# Altium footprint library footprints.PcbLib: 65 footprints (part 1 of 5)
Each footprint in its own frame and in the unit in brackets; x right, y up, seen from the top. Pads: shape width x height; smd on the part's side, far side on the other; paste and mask are expansions set on the pad; w line width, h text height; cw(c..) or ccw(c..) is an arc to the next point about the centre after c.
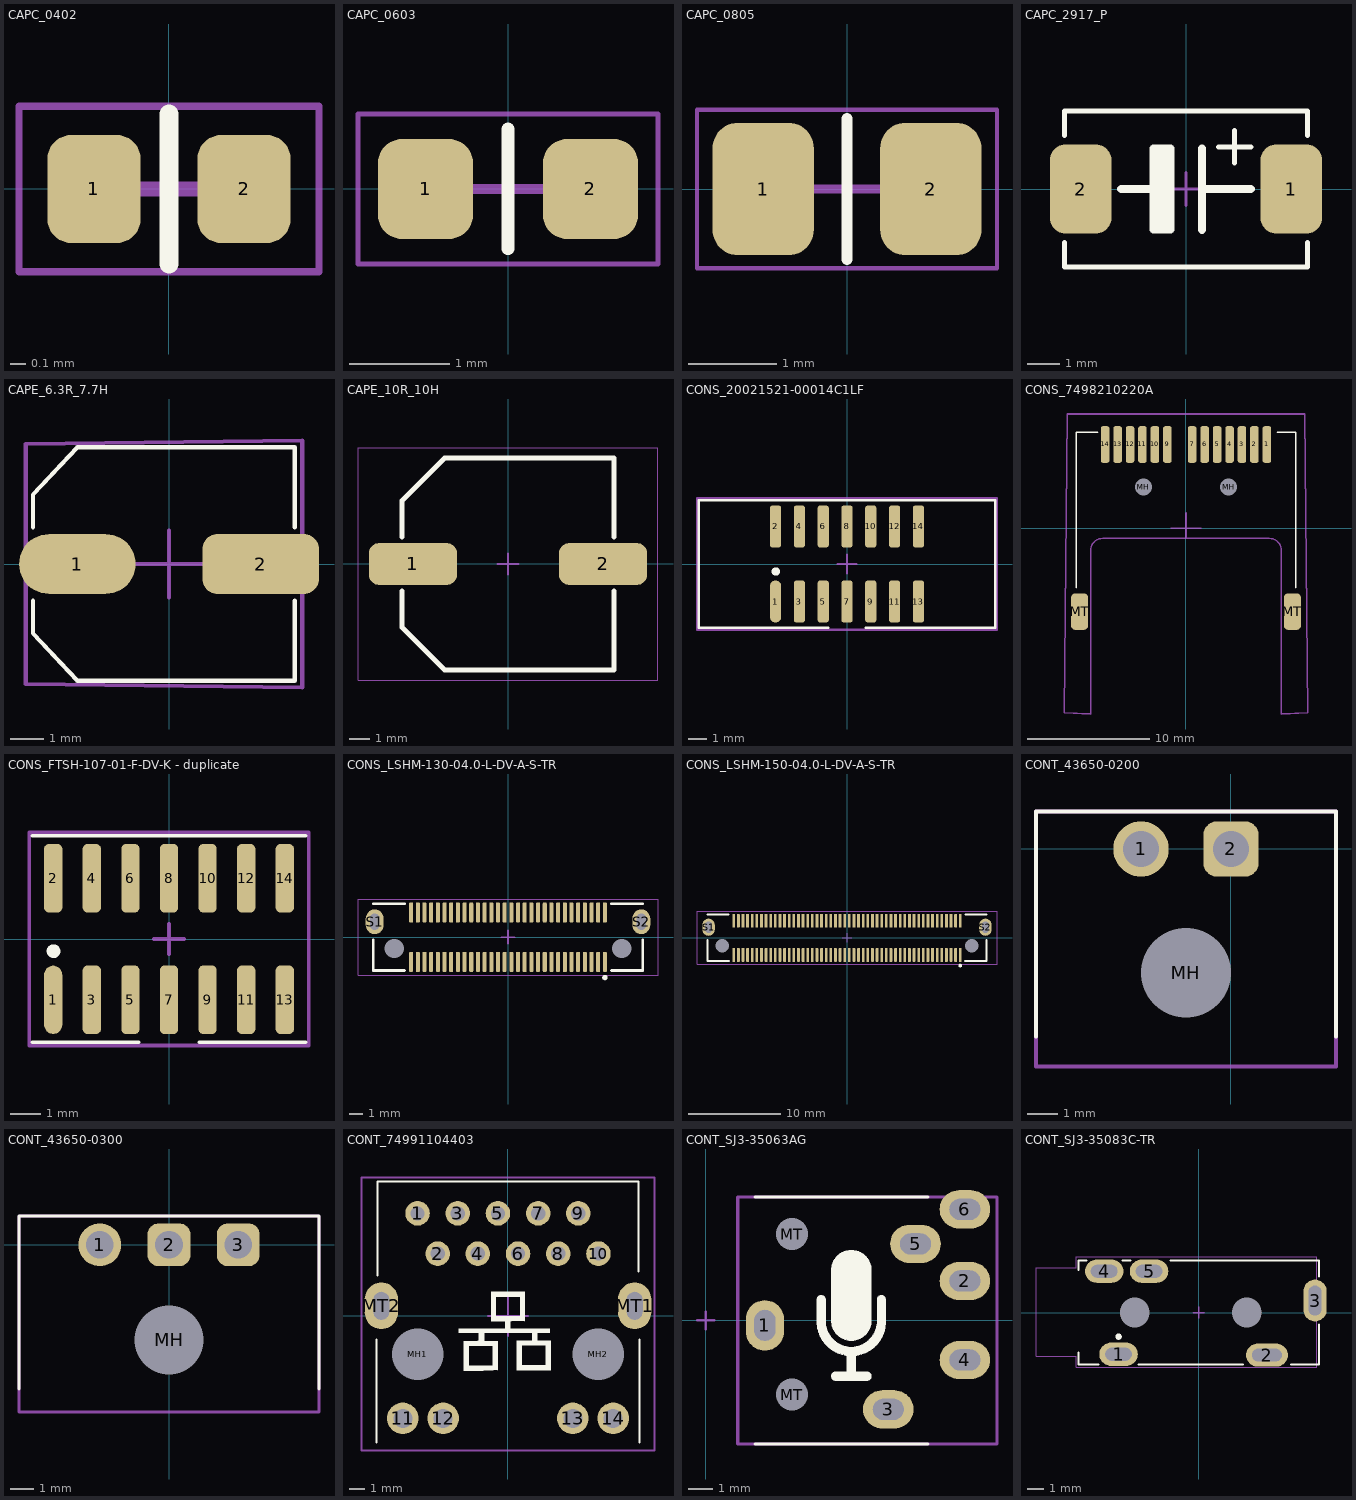
[diagram p0: the footprints below, top view; thin cyan lines are the x and y axes]

## CAPC_0402 [mm] "Chip Capacitor, 2-Leads, Body 1,00x0,50mm, IPC Medium Density"
height 0.7
pads (2):
  rrect50% 0.62x0.72 smd: 1(-0.5,0) 2(0.5,0)
Top Overlay:
  lines w0.125: 0,-0.5 0,0 0,0.5
Mechanical 15:
  lines w0.05: -1,-0.55 -1,0.55 1,0.55 1,-0.55 -1,-0.55
  lines w0.1: -0.35,0 0.35,0 ; 0,-0.35 0,0.35
3D body "CAPC1005X07N.step": height 0.7, standoff 0, extent -0.6,-0.35 0.6,0.35

## CAPC_0603 [mm] "Chip Capacitor, 2-Leads, Body 1,60x0,80mm, IPC Medium Density"
height 1
pads (2):
  rrect50% 0.95x1 smd: 1(-0.825,0) 2(0.825,0)
Top Overlay:
  lines w0.125: 0,-0.6 0,0 0,0.6
Mechanical 15:
  lines w0.05: -1.5,-0.75 -1.5,0.75 1.5,0.75 1.5,-0.75 -1.5,-0.75
  lines w0.1: -0.5,0 0.5,0 ; 0,-0.5 0,0.5
3D body "CAPC1608X10N.step": height 1, standoff 0, extent -0.95,-0.5 0.95,0.5

## CAPC_0805 [mm] "Chip Capacitor, 2-Leads, Body 2,00x1,25mm, IPC Medium Density"
height 1.5
pads (2):
  rrect50% 1.15x1.5 smd: 1(-0.95,0) 2(0.95,0)
Top Overlay:
  lines w0.125: 0,-0.8 0,0 0,0.8
Mechanical 15:
  lines w0.05: -1.7,-0.9 -1.7,0.9 1.7,0.9 1.7,-0.9 -1.7,-0.9
  lines w0.1: -0.5,0 0.5,0 ; 0,-0.5 0,0.5
3D body "CAPC2012X15N.step": height 1.5, standoff 0, extent -1.175,-0.75 1.175,0.75

## CAPC_2917_P [mm]
pads (2):
  rrect50% 1.9x2.75 smd: 1(3.25,0) 2(-3.25,0)
Top Overlay:
  region: -1,1.25 -0.5,1.25 -0.5,-1.25 -1,-1.25
  lines w0.15: -3.75,-1.65 -3.75,-2.4 3.75,-2.4 3.75,-1.65 ; -3.75,1.65 -3.75,2.4 3.75,2.4 3.75,1.65 ; 1,1.3 1.5,1.3 ; 1.5,0.8 1.5,1.3 ; 1.5,1.8 1.5,1.3 ; 2,1.3 1.5,1.3
  lines w0.25: -1.995,0.005 -0.495,0.005 ; -0.5,0 -0.5,1.25 ; 0.495,1.245 0.495,-1.255 0.495,-0.005 1.995,-0.005 ; -1,-1.25 -0.477,-1.25 -0.477,1.25 -1,1.25 -1,-1.25
Mechanical 15:
  lines w0.1: -0.5,0 0.5,0 ; 0,-0.5 0,0.5
3D body "293D226X9035D2TE3.stp": height 2.88, standoff -0.04, extent -3.594,-2.219 3.594,2.197

## CAPE_6.3R_7.7H [mm]
pads (2):
  oval 3.5x1.8 smd: 1(-2.75,0)
  rrect50% 3.5x1.8 smd: 2(2.75,0)
Top Overlay:
  lines w0.125: -4.078,-1.1 -4.078,-2.078 -2.75,-3.5 3.773,-3.5 3.773,-1.1 ; -4.078,1.1 -4.078,2.078 -2.75,3.5 3.773,3.5 3.773,1.1
Mechanical 15:
  lines w0.125: -1,0 0,0 ; 0,-1 0,0 ; 0,1 0,0 ; 1,0 0,0 ; -4.3,-3.6 4,-3.7 4,0 4,3.7 -4.3,3.6 -4.3,0 -4.3,-3.6
3D body "EDK107M035S9HAA.stp": height 8.01, standoff 0, extent -3.95,-3.4 3.65,3.4

## CAPE_10R_10H [mm] "Aluminum Electrolytic Capacitor, Body 10,30x10,30x10,50mm, IPC Medium Density"
height 10.5
pads (2):
  rrect50% 4.3x2.05 smd: 1(-4.625,0) 2(4.625,0)
Top Overlay:
  lines w0.25: -5.15,-1.325 -5.15,-3.087 -3.087,-5.15 5.15,-5.15 5.15,-1.325 ; -5.15,1.325 -5.15,3.087 -3.087,5.15 5.15,5.15 5.15,1.325
Mechanical 15:
  lines w0.05: -7.3,-5.65 7.3,-5.65 7.3,5.65 -7.3,5.65 -7.3,-5.65
  lines w0.1: -0.5,0 0.5,0 ; 0,-0.5 0,0.5
3D body "CAPAE120103X105N.step": height 10.5, standoff 0, extent -6,-5.15 6,5.15

## CONS_20021521-00014C1LF [mm]
pads (14):
  oval 0.6x2.25 smd: 1(-3.81,-2)
  rrect50% 0.6x2.25 smd: 2(-3.81,2) 3(-2.54,-2) 4(-2.54,2) 5(-1.27,-2) 6(-1.27,2) 7(0,-2) 8(0,2) 9(1.27,-2) 10(1.27,2) 11(2.54,-2) 12(2.54,2) 13(3.81,-2) 14(3.81,2)
Top Overlay:
  circle w0.25: c-3.8,-0.4 r0.1
  lines w0.125: -1,-3.4 -4.5,-3.4 -7.9,-3.4 -7.9,3.4 -4.5,3.4 1,3.4 4.5,3.4 7.9,3.4 7.9,-3.4 4.5,-3.4 1,-3.4
Mechanical 15:
  lines w0.125: -0.5,0 0,0 ; 0,-0.5 0,0 ; 0,0.5 0,0 ; 0.5,0 0,0 ; -8,-3.5 8,-3.5 8,3.5 -8,3.5 -8,-3.5
3D body "20021521-00014C1LF--3DModel-STEP-554624.STEP": height 5.6, standoff 0, extent -7.595,-2.75 7.595,2.75

## CONS_7498210220A [mm]
pads (17):
  rrect50% 0.7x3 smd: 1(6.63,6.85) 2(5.61,6.85) 3(4.59,6.85) 4(3.57,6.85) 5(2.55,6.85) 6(1.53,6.85) 7(0.51,6.85) 9(-1.53,6.85) 10(-2.55,6.85) 11(-3.57,6.85) 12(-4.59,6.85) 13(-5.61,6.85) 14(-6.63,6.85)
  round 1 hole 1.4 unplated: MH(-3.5,3.35) MH(3.5,3.35)
  rrect50% 1.4x3 smd: MT(-8.725,-6.85) MT(8.725,-6.85)
Top Overlay:
  lines w0.125: -9,-4.9 -9,7.85 -7.25,7.85 ; 7.5,7.85 9,7.85 9,-4.9
Mechanical 15:
  lines w0.125: -1.25,0 0,0 ; -7.825,-8.55 -7.825,-15.25 -10,-15.15 -9.75,9.35 0,9.35 9.75,9.35 10,-15.15 7.825,-15.25 7.825,-8.55 ; -7.825,-8.55 -7.825,-3.55 ; -7.825,-8.55 -7.825,-3.55 ; -7.825,-3.55 -7.825,-1.85 cw(c-6.825,-1.85) -6.825,-0.85 -5,-0.85 ; -5,-0.85 0,-0.85 ; -5,-0.85 0,-0.85 ; 0,-0.85 0,0 ; 0,-0.85 0,0 ; 0,-0.85 5,-0.85 ; 0,-0.85 5,-0.85 ; 0,0 1.25,0 0,0 ; 0,0 0,1.25 0,0 ; 5,-0.85 6.825,-0.85 cw(c6.825,-1.85) 7.825,-1.85 7.825,-3.55 ; 7.825,-8.55 7.825,-3.55 ; 7.825,-8.55 7.825,-3.55
3D body "7498210220A.stp": height 8.9, standoff -2.4, extent -8.775,-14.82 8.775,7.655

## CONS_FTSH-107-01-F-DV-K - duplicate [mm]
pads (14):
  oval 0.6x2.25 smd: 1(-3.81,-2)
  rrect50% 0.6x2.25 smd: 2(-3.81,2) 3(-2.54,-2) 4(-2.54,2) 5(-1.27,-2) 6(-1.27,2) 7(0,-2) 8(0,2) 9(1.27,-2) 10(1.27,2) 11(2.54,-2) 12(2.54,2) 13(3.81,-2) 14(3.81,2)
Top Overlay:
  circle w0.25: c-3.8,-0.4 r0.1
  lines w0.125: -4.5,-3.4 -1,-3.4 ; -4.5,3.4 1,3.4 4.5,3.4 ; 1,-3.4 4.5,-3.4
Mechanical 15:
  lines w0.125: -0.5,0 0,0 ; 0,-0.5 0,0 ; 0,0.5 0,0 ; 0.5,0 0,0 ; -4.6,-3.5 4.6,-3.5 4.6,3.5 -4.6,3.5 -4.6,-3.5
3D body "FTSH-107-01-F-DV-K.stp": height 6.11, standoff -0.01, extent -4.445,-2.921 4.445,2.921

## CONS_LSHM-130-04.0-L-DV-A-S-TR [mm]
pads (64):
  rrect50% 0.3x1.5 smd: 1(7.25,-1.85) 2(7.25,1.85) 3(6.75,-1.85) 4(6.75,1.85) 5(6.25,-1.85) 6(6.25,1.85) 7(5.75,-1.85) 8(5.75,1.85) 9(5.25,-1.85) 10(5.25,1.85) 11(4.75,-1.85) 12(4.75,1.85) 13(4.25,-1.85) 14(4.25,1.85) 15(3.75,-1.85) 16(3.75,1.85) 17(3.25,-1.85) 18(3.25,1.85) 19(2.75,-1.85) 20(2.75,1.85) 21(2.25,-1.85) 22(2.25,1.85) 23(1.75,-1.85) 24(1.75,1.85) 25(1.25,-1.85) 26(1.25,1.85) 27(0.75,-1.85) 28(0.75,1.85) 29(0.25,-1.85) 30(0.25,1.85) 31(-0.25,-1.85) 32(-0.25,1.85) 33(-0.75,-1.85) 34(-0.75,1.85) 35(-1.25,-1.85) 36(-1.25,1.85) 37(-1.75,-1.85) 38(-1.75,1.85) 39(-2.25,-1.85) 40(-2.25,1.85) 41(-2.75,-1.85) 42(-2.75,1.85) 43(-3.25,-1.85) 44(-3.25,1.85) 45(-3.75,-1.85) 46(-3.75,1.85) 47(-4.25,-1.85) 48(-4.25,1.85) 49(-4.75,-1.85) 50(-4.75,1.85) 51(-5.25,-1.85) 52(-5.25,1.85) 53(-5.75,-1.85) 54(-5.75,1.85) 55(-6.25,-1.85) 56(-6.25,1.85) 57(-6.75,-1.85) 58(-6.75,1.85) 59(-7.25,-1.85) 60(-7.25,1.85)
  oval 1.35x1.85 hole 0.7 slot 1.2 at 90 deg: S1(-9.975,1.15) S2(9.975,1.15)
  round 1.35 hole 1.45 unplated: ""(-8.5,-0.85) ""(8.5,-0.85)
Top Overlay:
  circle w0.2: c7.25,-3.025 r0.1
  lines w0.2: -10.075,-0.2 -10.075,-2.49 -7.75,-2.49 ; -10.075,2.51 -7.75,2.51 ; 7.75,-2.49 10.075,-2.49 10.075,-0.2 ; 7.75,2.51 10.075,2.51
Mechanical 15:
  lines w0.05: -11.225,-2.85 -11.225,2.85 11.225,2.85 11.225,-2.85 -11.225,-2.85
  lines w0.125: -0.5,0 0,0 ; 0,-0.5 0,0 ; 0.5,0 0,0 ; 0,0 0,0.5 0,0
3D body "LSHM-130-04.0-L-DV-A-S-TR.stp": height 5.4, standoff -1.7, extent -10.401,-2.49 10.401,2.54

## CONS_LSHM-150-04.0-L-DV-A-S-TR [mm]
pads (104):
  rrect50% 0.3x1.5 smd: 1(12.25,-1.85) 2(12.25,1.85) 3(11.75,-1.85) 4(11.75,1.85) 5(11.25,-1.85) 6(11.25,1.85) 7(10.75,-1.85) 8(10.75,1.85) 9(10.25,-1.85) 10(10.25,1.85) 11(9.75,-1.85) 12(9.75,1.85) 13(9.25,-1.85) 14(9.25,1.85) 15(8.75,-1.85) 16(8.75,1.85) 17(8.25,-1.85) 18(8.25,1.85) 19(7.75,-1.85) 20(7.75,1.85) 21(7.25,-1.85) 22(7.25,1.85) 23(6.75,-1.85) 24(6.75,1.85) 25(6.25,-1.85) 26(6.25,1.85) 27(5.75,-1.85) 28(5.75,1.85) 29(5.25,-1.85) 30(5.25,1.85) 31(4.75,-1.85) 32(4.75,1.85) 33(4.25,-1.85) 34(4.25,1.85) 35(3.75,-1.85) 36(3.75,1.85) 37(3.25,-1.85) 38(3.25,1.85) 39(2.75,-1.85) 40(2.75,1.85) 41(2.25,-1.85) 42(2.25,1.85) 43(1.75,-1.85) 44(1.75,1.85) 45(1.25,-1.85) 46(1.25,1.85) 47(0.75,-1.85) 48(0.75,1.85) 49(0.25,-1.85) 50(0.25,1.85) 51(-0.25,-1.85) 52(-0.25,1.85) 53(-0.75,-1.85) 54(-0.75,1.85) 55(-1.25,-1.85) 56(-1.25,1.85) 57(-1.75,-1.85) 58(-1.75,1.85) 59(-2.25,-1.85) 60(-2.25,1.85) 61(-2.75,-1.85) 62(-2.75,1.85) 63(-3.25,-1.85) 64(-3.25,1.85) 65(-3.75,-1.85) 66(-3.75,1.85) 67(-4.25,-1.85) 68(-4.25,1.85) 69(-4.75,-1.85) 70(-4.75,1.85) 71(-5.25,-1.85) 72(-5.25,1.85) 73(-5.75,-1.85) 74(-5.75,1.85) 75(-6.25,-1.85) 76(-6.25,1.85) 77(-6.75,-1.85) 78(-6.75,1.85) 79(-7.25,-1.85) 80(-7.25,1.85) 81(-7.75,-1.85) 82(-7.75,1.85) 83(-8.25,-1.85) 84(-8.25,1.85) 85(-8.75,-1.85) 86(-8.75,1.85) 87(-9.25,-1.85) 88(-9.25,1.85) 89(-9.75,-1.85) 90(-9.75,1.85) 91(-10.25,-1.85) 92(-10.25,1.85) 93(-10.75,-1.85) 94(-10.75,1.85) 95(-11.25,-1.85) 96(-11.25,1.85) 97(-11.75,-1.85) 98(-11.75,1.85) 99(-12.25,-1.85) 100(-12.25,1.85)
  oval 1.35x1.85 hole 0.7 slot 1.2 at 90 deg: S1(-14.975,1.15) S2(14.975,1.15)
  round 1.35 hole 1.45 unplated: ""(-13.5,-0.85) ""(13.5,-0.85)
Top Overlay:
  circle w0.2: c12.25,-3 r0.1
  lines w0.2: -15.075,-0.3 -15.075,-2.49 ; -15.075,-0.2 -15.075,-2.49 ; -15.075,2.51 -12.8,2.51 ; -12.8,-2.49 -15.075,-2.49 ; -12.75,-2.49 -15.075,-2.49 ; 12.75,-2.49 15.075,-2.49 ; 12.8,2.51 15.075,2.51 ; 15.075,-0.3 15.075,-2.49 ; 15.075,-0.2 15.075,-2.49
Mechanical 15:
  lines w0.05: -16.225,-2.85 16.225,-2.85 16.225,2.85 -16.225,2.85 -16.225,-2.85
  lines w0.125: -0.5,0 0,0 ; 0,-0.5 0,0 ; 0.5,0 0,0 ; 0,0 0,0.5 0,0
3D body "LSHM-150-04.0-L-DV-A-S-TR.stp": height 5.4, standoff -1.7, extent -15.401,-2.49 15.401,2.54

## CONT_43650-0200 [mm]
pads (3):
  round 1.85 hole 1.2: 1(-3,0)
  rrect50% 1.85x1.85 hole 1.2: 2(0,0)
  rrect50% 1.5x1.5 hole 3 unplated: MH(-1.5,-4.125)
Top Overlay:
  lines w0.125: -6.5,-6.25 -6.5,1.25 -5,1.25 3.5,1.25 3.5,-6.25
Mechanical 15:
  lines w0.125: -0.75,0 0,0 ; 0,-0.75 0,-0.5 0,0 ; 0,0.75 0,0 ; 0.75,0 0.5,0 0,0 ; -6.5,-7.25 -6.5,1.25 3.5,1.25 3.5,-7.25 -6.5,-7.25
3D body "43650-0200.stp": height 5.54, standoff -3.37, extent -6.325,-8.75 3.325,1.15

## CONT_43650-0300 [mm]
pads (4):
  round 1.85 hole 1.2: 1(-3,0)
  rrect50% 1.85x1.85 hole 1.2: 2(0,0) 3(3,0)
  rrect50% 1.5x1.5 hole 3 unplated: MH(0,-4.125)
Top Overlay:
  lines w0.125: -6.5,-6.25 -6.5,1.25 -5,1.25 5,1.25 6.5,1.25 6.5,-6.25
Mechanical 15:
  lines w0.125: -0.75,0 0,0 ; 0,-0.75 0,-0.5 0,0 ; 0,0.75 0,0 ; 0.75,0 0.5,0 0,0 ; -6.5,-7.25 6.5,-7.25 6.5,1.25 -6.5,1.25 -6.5,-7.25
3D body "43650-0300.stp": height 5.66, standoff -3.21, extent -6.325,-8.8 6.325,1.1

## CONT_74991104403 [mm]
pads (18):
  round 1.55 hole 0.9: 1(-5.715,6.475) 2(-4.445,3.935) 3(-3.175,6.475) 4(-1.905,3.935) 5(-0.635,6.475) 6(0.635,3.935) 7(1.905,6.475) 8(3.175,3.935) 9(4.445,6.475) 10(5.715,3.935)
  round 2 hole 1.2: 11(-6.64,-6.475) 12(-4.1,-6.475) 13(4.1,-6.475) 14(6.64,-6.475)
  round 1.3 hole 3.25 unplated: MH1(-5.715,-2.415) MH2(5.715,-2.415)
  oval 2.1x2.95 hole 1 slot 1.75 at 90 deg: MT1(8,0.635) MT2(-8,0.635)
Top Overlay:
  region: 122 vertices and 3 holes, not listed, extent -3.117,-3.45 2.69,1.529
  lines w0.125: -8.3,-8 -8.3,-1.5 ; -8.25,2.54 -8.25,2.79 -8.25,8.49 8.25,8.49 8.25,2.79 ; 8.3,-8 8.3,-1.5
Mechanical 15:
  lines w0.125: -1.25,-0.01 0,-0.01 ; 0,-1.26 0,-0.01 ; 0,1.24 0,-0.01 ; 1.25,-0.01 0,-0.01 ; -9.25,-8.5 9.25,-8.5 9.25,8.74 -9.25,8.74 -9.25,-8.5
3D body "STP_74991104403 (rev1).stp": height 13.32, standoff -3.82, extent -8.17,-13.075 8.17,8.275

## CONT_SJ3-35063AG [mm]
pads (8):
  oval 1.55x2.05 hole 0.85 slot 1.25 at 90 deg unplated: 1(2.4,-0.2)
  oval 2.05x1.55 hole 0.85 slot 1.25 at 0 deg unplated: 2(10.5,1.6) 3(7.4,-3.6) 4(10.5,-1.6) 5(8.5,3.1) 6(10.5,4.5)
  round 1 hole 1.3 unplated: MT(3.5,-3) MT(3.5,3.5)
Top Overlay:
  drawing of 4 lines, arcs and shapes, not listed
Mechanical 15:
  lines w0.1: -0.35,0 0.35,0 ; 0,-0.35 0,0.35
  lines w0.125: 1.3,-5 11.8,-5 11.8,5 1.3,5 1.3,-5
3D body "Same_Sky_SJ3-35063AG.step": height 5.35, standoff -1.9, extent -3,-4.6 11,4.9

## CONT_SJ3-35083C-TR [mm]
pads (7):
  oval 2.4x1.45 hole 0.8 slot 1.65 at 0 deg: 1(-5,-2.6) 4(-5.9,2.58) 5(-3.1,2.58)
  oval 2.616x1.45 hole 0.8 slot 1.85 at 0 deg: 2(4.25,-2.65)
  oval 1.45x2.616 hole 0.8 slot 1.85 at 90 deg: 3(7.25,0.75)
  round 1.8 hole 1.85 unplated: ""(-4,0) ""(3,0)
Top Overlay:
  circle w0.2: c-5,-1.5 r0.1
  lines w0.125: -7.5,-2.5 -7.5,-3.25 -6.25,-3.25 ; -7.5,2.64 -7.5,3.25 -7,3.25 ; -4.75,3.25 -4.25,3.25 ; -3.75,-3.25 2.75,-3.25 ; -1.75,3.25 7.5,3.25 7.5,2.25 ; 5.75,-3.25 7.5,-3.25 7.5,-0.75
Mechanical 15:
  lines w0.05: -10.15,-2.71 -10.15,2.79 -7.65,2.79 -7.65,3.484 7.35,3.484 7.35,-3.404 -7.65,-3.404 -7.65,-2.71 -10.15,-2.71
  lines w0.1: -0.35,0 0.35,0 ; 0,-0.35 0,0.35
3D body "SJ3-35083C-TR.stp": height 5.05, standoff -1.55, extent -10,-3.1 7.3,3.1